# Altium schematic symbol library C128624.SchLib: 1 symbol
Pins are listed as number, name and electrical type; pins without a type are passive.

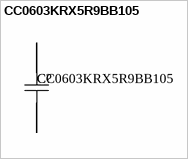
[diagram p0: symbol CC0603KRX5R9BB105]

## CC0603KRX5R9BB105
designator C?
1uF ±10% 50V Ceramic Capacitor X5R 0603; Name: C128624; Source: LCSC; Value: 1uF
footprint C0603 (1uF ±10% 50V Ceramic Capacitor X5R 0603)
pins: 1, 2